# Altium schematic symbol library Diode%.SchLib: 376 symbols (part 5 of 9)
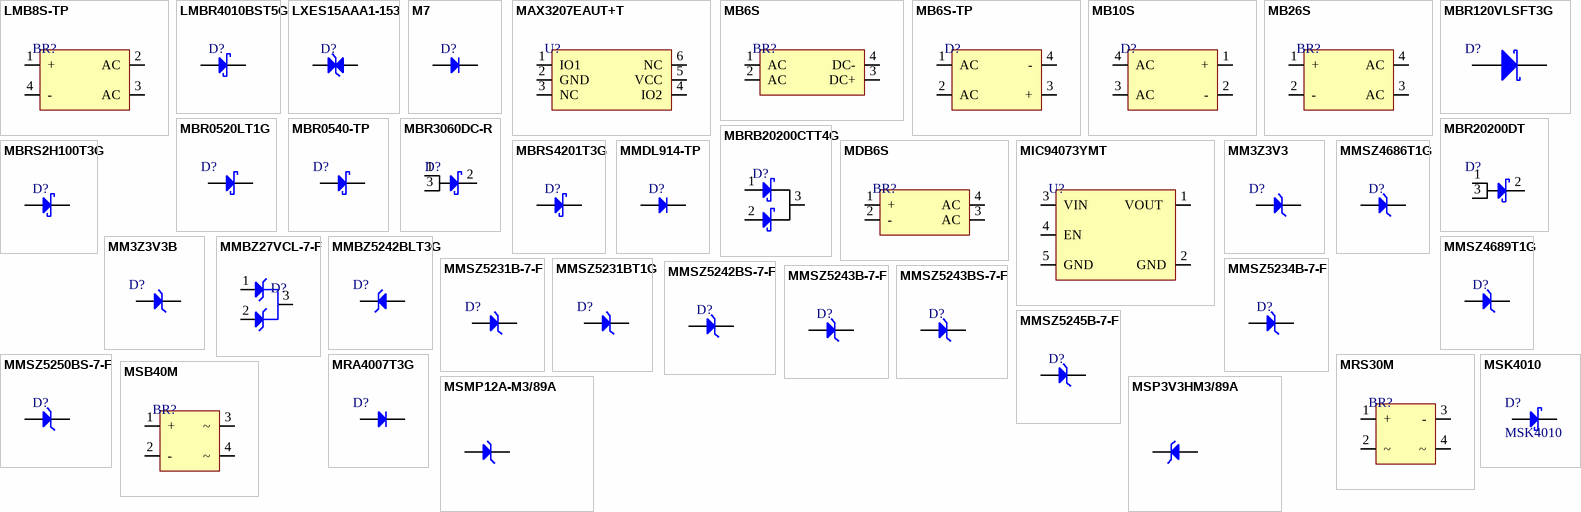
[diagram p13: symbols LMB8S-TP to MSP3V3HM3/89A]

## MIC94073YMT
designator U?
HIGH SIDE POWER SWITCHES; Manufacturer: Mirel Inc.; Manufacturer Part Number: MIC94073YMT; Package: 4-UFDFN Exposed Pad, 4-TMLF®; Item Type: Power Switch
footprint 4-TMLF® (1.2x1.6)
pins: 1 VOUT , 2 GND, 3 VIN, 4 EN, 5 GND

## MM3Z3V3
designator D?
±5% Single 3.1V~3.5V 300mW 3.3V SOD-323 Zener Diodes ROHS; Manufacturer: JSMSEMI; Manufacturer Part Number: MM3Z3V3; Item Type: Diode; ComponentLink1Description: LCSC; ComponentLink1URL: https://www.lcsc.com/product-detail/Zener-Diodes_Shandong-Jingdao-Microelectronics-MM3Z3V3_C123917.html; Package: SOD-323; LCSC Part Number: C123917
footprint SOD-323
pins: 1 K, 2 A

## MM3Z3V3B
designator D?
DIODE ZENER 3.3V 200MW SOD323F; Manufacturer: ON Semiconductor / Fairchild; Manufacturer Part Number: MM3Z3V3B; Forward Voltage: 1V; Tolerance: 2%; Impedance: 89R; Max Reverse Leakage Current: 4.5uA; Test Current: 5mA; Element Configuration: Single; Supplier 1: Digi-Key; Stock 1: 473644; Pricing 1: 1=0.22, 10=0.18, 100=0.0956, 500=0.06288, 1000=0.04276 (USD); Mount: Surface Mount; Number of Pins: 2; Weight: 0.0276g; Min Operating Temperature: -65°C; Max Operating Temperature: 150°C; Packaging: Tape and Reel; Package Quantity: 1; Max Power Dissipation: 200mW; Zener Voltage: 3.3V; Voltage Tolerance: 2%; Power Dissipation: 200mW; Working Voltage: 3.3V; Peak Reverse Current: 4.5uA; Length: 1.3mm; Height: 1mm; Width: 1.7mm; Radiation Hardening: No; REACH SVHC: No SVHC; Lead Free: Lead Free; ComponentLink1URL: http://www.onsemi.com/pub/Collateral/MM3Z9V1B-D.pdf?src-supplier=Digi-Key; ComponentLink1Description: http://www.onsemi.com/pub/Collateral/MM3Z9V1B-D.pdf?src-supplier=Digi-Key; ComponentLink2URL: http://www.mouser.com/ds/2/149/MM3Z3V3B-187166.pdf?src-supplier=Mouser; ComponentLink2Description: http://www.mouser.com/ds/2/149/MM3Z3V3B-187166.pdf?src-supplier=Mouser; ComponentLink3URL: https://www.fairchildsemi.com/datasheets/MM/MM3Z9V1B.pdf?src-supplier=Avnet; ComponentLink3Description: https://www.fairchildsemi.com/datasheets/MM/MM3Z9V1B.pdf?src-supplier=Avnet; ComponentLink4URL: http://www.farnell.com/datasheets/1706525.pdf?src-supplier=Element14; ComponentLink4Description: http://www.farnell.com/datasheets/1706525.pdf?src-supplier=Element14; Supplier Part Number 1: MM3Z3V3BCT-ND; LCSC Part Number: C2978865; Item Type: Diode
footprint SOD323F
pins: 1 A, 2 K

## MMBZ27VCL-7-F
designator D?
TVS DIODE 22VWM 38VC SOT23-3; Manufacturer: Diodes; Manufacturer Part Number: MMBZ27VCL-7-F; Item Type: TVS Diodes; Supplier: Arrow Electronics; LCSC Part Number: C698227; RoHS: Yes; Stock: 153000; Pricing: 3000=0.0452, 6000=0.0449, 9000=0.0303 (USD); ComponentLink1URL: https://datasheet.ciiva.com/4516/ds30352-85130-4516788.pdf?src-supplier=Mouser; ComponentLink1Description: https://datasheet.ciiva.com/4516/ds30352-85130-4516788.pdf?src-supplier=Mouser; ComponentLink2URL: https://datasheet.ciiva.com/27052/1540877-27052409.pdf?src-supplier=Jameco; ComponentLink2Description: https://datasheet.ciiva.com/27052/1540877-27052409.pdf?src-supplier=Jameco; ComponentLink3URL: https://datasheet.ciiva.com/3304/ds30352-3304032.pdf?src-supplier=Avnet; ComponentLink3Description: https://datasheet.ciiva.com/3304/ds30352-3304032.pdf?src-supplier=Avnet; ComponentLink4URL: https://datasheet.ciiva.com/15143/getdatasheetpartid-61120-15143181.pdf?src-supplier=Verical; ComponentLink4Description: https://datasheet.ciiva.com/15143/getdatasheetpartid-61120-15143181.pdf?src-supplier=Verical; ComponentLink5URL: https://datasheet.ciiva.com/16287/ds30352-16287067.pdf?src-supplier=Future+Electronics; ComponentLink5Description: https://datasheet.ciiva.com/16287/ds30352-16287067.pdf?src-supplier=Future+Electronics; ComponentLink6URL: https://datasheet.ciiva.com/11193/ds30352-11193255.pdf?src-supplier=Avnet; ComponentLink6Description: https://datasheet.ciiva.com/11193/ds30352-11193255.pdf?src-supplier=Avnet; ComponentLink7URL: https://datasheet.ciiva.com/5807/ds30352-5807782.pdf?src-supplier=Farnell; ComponentLink7Description: https://datasheet.ciiva.com/5807/ds30352-5807782.pdf?src-supplier=Farnell
footprint SOT-23 (TRANS NPN 40V 0.6A SOT23)
pins: 1 ANODE, 2 Anode, 3 Cathode

## MMBZ5242BLT3G
designator D?
DIODE ZENER 12V 225MW SOT23-3; Manufacturer: ON Semiconductor; Manufacturer Part Number: MMBZ5242BLT3G; Impedance: 30R; Voltage Tolerance: 5%; Power Dissipation: 300mW; Max Reverse Leakage Current: 1uA; Element Configuration: Single; Supplier 1: Digi-Key; Stock 1: 9410; Pricing 1: 1=0.16, 10=0.143, 100=0.0779, 500=0.04792, 1000=0.03267, 2000=0.02777, 5000=0.02505 (USD); Case/Package: SOT-23-3; Number of Pins: 3; Min Operating Temperature: -65°C; Max Operating Temperature: 150°C; Package Quantity: 10000; Packaging: Tape and Reel; Zener Voltage: 12V; Max Power Dissipation: 225mW; Tolerance: 5%; Lead Free: Lead Free; RoHS Compliant: Yes; ComponentLink1URL: http://www.mouser.com/ds/2/308/MMBZ5221BLT1-D-79158.pdf?src-supplier=Mouser; ComponentLink1Description: http://www.mouser.com/ds/2/308/MMBZ5221BLT1-D-79158.pdf?src-supplier=Mouser; Supplier Part Number 1: MMBZ5242BLT3GOSCT-ND; LCSC Part Number: C896784
footprint sot-23
pins: 1 A, 3 K

## MMDL914-TP
designator D?
100V 1V@10mA 4ns 200mA SOD-323 Switching Diodes ROHS; Manufacturer: MCC; Manufacturer Part Number: MMDL914-TP; Item Type: Diode; Supplier: Digikey; LCSC Part Number: C668970; RoHS: Yes; Stock: 172971; Pricing: 1=0.15, 10=0.108, 100=0.0585, 500=0.04594, 1000=0.03191 (USD); ComponentLink1URL: https://datasheet.ciiva.com/6367/mmdl914sod-323-6367364.pdf?src-supplier=Digikey; ComponentLink1Description: https://datasheet.ciiva.com/6367/mmdl914sod-323-6367364.pdf?src-supplier=Digikey; ComponentLink2URL: https://datasheet.ciiva.com/24097/mmdl914sod-323-24097719.pdf?src-supplier=Mouser; ComponentLink2Description: https://datasheet.ciiva.com/24097/mmdl914sod-323-24097719.pdf?src-supplier=Mouser; ComponentLink3URL: https://datasheet.ciiva.com/6367/mmdl914sod-323-6367366.pdf?src-supplier=Digikey; ComponentLink3Description: https://datasheet.ciiva.com/6367/mmdl914sod-323-6367366.pdf?src-supplier=Digikey; ComponentLink4URL: https://datasheet.ciiva.com/6367/mmdl914sod-323-6367368.pdf?src-supplier=Digikey; ComponentLink4Description: https://datasheet.ciiva.com/6367/mmdl914sod-323-6367368.pdf?src-supplier=Digikey
footprint SOD-323
pins: 1 K, 2 A

## MMSZ4686T1G
designator D?
DIODE ZENER 3.9V 500MW SOD123; Manufacturer: ON Semiconductor; Manufacturer Part Number: MMSZ4686T1G; Item Type: Diodes; Material: 4239ConductorMaterial; Polarity: 5054Direction; Supplier: Future Electronics; LCSC Part Number: C236098; RoHS: Yes; Stock: 210000; Pricing: 3000=0.0182, 9000=0.0176, 30000=0.0169, 60000=0.0165, 120000=0.0158 (USD); Voltage Rating (DC): 3.9V; Power Rating: 500mW; Lead Free: 5697LeadFree; ComponentLink1URL: https://datasheet.ciiva.com/894/mmsz4678t1-d-894880.pdf?src-supplier=Digikey; ComponentLink1Description: https://datasheet.ciiva.com/894/mmsz4678t1-d-894880.pdf?src-supplier=Digikey; ComponentLink2URL: https://datasheet.ciiva.com/27056/2011651-27056164.pdf?src-supplier=Jameco; ComponentLink2Description: https://datasheet.ciiva.com/27056/2011651-27056164.pdf?src-supplier=Jameco; ComponentLink3URL: https://datasheet.ciiva.com/46396/1571947-46396198.pdf?src-supplier=Element14; ComponentLink3Description: https://datasheet.ciiva.com/46396/1571947-46396198.pdf?src-supplier=Element14; ComponentLink4URL: https://datasheet.ciiva.com/8346/mmsz4678t1-d-8346072.pdf?src-supplier=Avnet; ComponentLink4Description: https://datasheet.ciiva.com/8346/mmsz4678t1-d-8346072.pdf?src-supplier=Avnet; ComponentLink5URL: https://datasheet.ciiva.com/8347/mmsz4678t1-d-8347974.pdf?src-supplier=Avnet; ComponentLink5Description: https://datasheet.ciiva.com/8347/mmsz4678t1-d-8347974.pdf?src-supplier=Avnet; ComponentLink6URL: https://datasheet.ciiva.com/894/mmsz4678t1-d-894878.pdf?src-supplier=Digikey; ComponentLink6Description: https://datasheet.ciiva.com/894/mmsz4678t1-d-894878.pdf?src-supplier=Digikey; ComponentLink7URL: https://datasheet.ciiva.com/894/mmsz4678t1-d-894879.pdf?src-supplier=Digikey; ComponentLink7Description: https://datasheet.ciiva.com/894/mmsz4678t1-d-894879.pdf?src-supplier=Digikey
footprint SOD-123
pins: 1 A, 2 K

## MMSZ4689T1G
designator D?
DIODE ZENER 5.1V 500MW SOD123; Manufacturer: ON Semiconductor; Manufacturer Part Number: MMSZ4689T1G; Material: Plastic; Breakdown Voltage: 5.36V; Forward Voltage: 900mV; Tolerance: 5%; Max Reverse Leakage Current: 10uA; Zener Current: 50uA; Supplier: Future Electronics; LCSC Part Number: C236187; RoHS: Yes; Item Type: Diode; Stock: 105000; Pricing: 3000=0.0178, 9000=0.0172, 30000=0.0165, 60000=0.0161, 120000=0.0154 (USD); Case/Package: SOD-123-2; Pins: 2; Min Operating Temperature: -55°C; Max Operating Temperature: 150°C; Packaging: Tape and Reel; Voltage Rating (DC): 5.1V; Power Rating: 500mW; Max Power Dissipation: 500mW; Zener Voltage: 5.1V; Package Quantity: 1; Voltage Tolerance: 5%; Power Dissipation: 500mW; Working Voltage: 5.1V; Max Reverse Current: 50uA; Test Current: 50uA; Max Breakdown Voltage: 5.36V; Termination: SMD/SMT; Length: 2.69mm; Width: 1.6mm; Height: 1.12mm; Radiation Hardening: No; Reach SVHC Compliant: No; Lead Free: Lead Free; RoHS Compliant: Yes; ComponentLink1URL: https://datasheet.ciiva.com/15141/getdatasheetpartid-37234-15141921.pdf?src-supplier=Verical; ComponentLink1Description: https://datasheet.ciiva.com/15141/getdatasheetpartid-37234-15141921.pdf?src-supplier=Verical; ComponentLink2URL: https://datasheet.ciiva.com/8347/mmsz4678t1-d-8347996.pdf?src-supplier=Avnet; ComponentLink2Description: https://datasheet.ciiva.com/8347/mmsz4678t1-d-8347996.pdf?src-supplier=Avnet; ComponentLink3URL: https://datasheet.ciiva.com/894/mmsz4678t1-d-894948.pdf?src-supplier=Digikey; ComponentLink3Description: https://datasheet.ciiva.com/894/mmsz4678t1-d-894948.pdf?src-supplier=Digikey; ComponentLink4URL: https://datasheet.ciiva.com/894/mmsz4678t1-d-894949.pdf?src-supplier=Digikey; ComponentLink4Description: https://datasheet.ciiva.com/894/mmsz4678t1-d-894949.pdf?src-supplier=Digikey; ComponentLink5URL: https://datasheet.ciiva.com/894/mmsz4678t1-d-894947.pdf?src-supplier=Digikey; ComponentLink5Description: https://datasheet.ciiva.com/894/mmsz4678t1-d-894947.pdf?src-supplier=Digikey; ComponentLink6URL: https://datasheet.ciiva.com/8026/mmsz4678t1-d-8026838.pdf?src-supplier=Element14; ComponentLink6Description: https://datasheet.ciiva.com/8026/mmsz4678t1-d-8026838.pdf?src-supplier=Element14; ComponentLink7URL: https://datasheet.ciiva.com/22697/1796559-22697915.pdf?src-supplier=Element14; ComponentLink7Description: https://datasheet.ciiva.com/22697/1796559-22697915.pdf?src-supplier=Element14; ComponentLink8URL: https://datasheet.ciiva.com/27054/1925110-27054860.pdf?src-supplier=Jameco; ComponentLink8Description: https://datasheet.ciiva.com/27054/1925110-27054860.pdf?src-supplier=Jameco
footprint SOD-123
pins: 1 A, 2 K

## MMSZ5231B-7-F
designator D?
DIODE ZENER 5.1V 500MW SOD123; Manufacturer: Diodes; Manufacturer Part Number: MMSZ5231B-7-F; Item Type: Zener Diode; Supplier: Future Electronics; Supplier Part Number: 5522370; RoHS: Yes; Category: Zener Diodes; Stock: 273000; Pricing: 3000=0.0138, 12000=0.0132, 45000=0.0127, 90000=0.0124, 225000=0.0118 (USD); ComponentLink1URL: https://datasheet.ciiva.com/34302/1541116-34302407.pdf?src-supplier=Jameco; ComponentLink1Description: https://datasheet.ciiva.com/34302/1541116-34302407.pdf?src-supplier=Jameco; ComponentLink2URL: https://datasheet.ciiva.com/26912/getdatasheetpartid-141394-26912348.pdf?src-supplier=Verical; ComponentLink2Description: https://datasheet.ciiva.com/26912/getdatasheetpartid-141394-26912348.pdf?src-supplier=Verical; ComponentLink3URL: https://datasheet.ciiva.com/4734/ds18010-38133-4734216.pdf?src-supplier=Mouser; ComponentLink3Description: https://datasheet.ciiva.com/4734/ds18010-38133-4734216.pdf?src-supplier=Mouser; LCSC Part Number: C85181
footprint SOD-123
pins: 1 A, 2 K

## MMSZ5231BT1G
designator D?
DIODE ZENER 5.1V 500MW SOD123; Manufacturer: ON Semiconductor; Manufacturer Part Number: MMSZ5231BT1G; Material: Plastic; Max Reverse Leakage Current: 5uA; Impedance: 17R; Tolerance: 5%; Zener Current: 10mA; Test Current: 20mA; Forward Voltage: 900mV; Breakdown Voltage: 5.36V; Supplier 1: Allied Electronics; RoHS: Yes; Category: Zener Diodes; Case/Package: SOD-123-2; Pins: 2; Min Operating Temperature: -55°C; Max Operating Temperature: 150°C; Max Power Dissipation: 500mW; Packaging: Tape and Reel; Zener Voltage: 5.1V; Package Quantity: 3000; Series: Automotive, AEC-Q101; Voltage Tolerance: 5%; Power Dissipation: 500mW; Working Voltage: 5.1V; Max Reverse Current: 5uA; Voltage Rating (DC): 5.1V; Power Rating: 500mW; Length: 2.69mm; Width: 1.6mm; Height: 1.12mm; RoHS Compliant: Yes; Lead Free: Lead Free; Reach SVHC Compliant: No; ComponentLink1URL: https://datasheet.ciiva.com/23815/1708301-23815376.pdf?src-supplier=Newark; ComponentLink1Description: https://datasheet.ciiva.com/23815/1708301-23815376.pdf?src-supplier=Newark; ComponentLink2URL: https://datasheet.ciiva.com/22626/1708301-22626967.pdf?src-supplier=Element14; ComponentLink2Description: https://datasheet.ciiva.com/22626/1708301-22626967.pdf?src-supplier=Element14; ComponentLink3URL: https://datasheet.ciiva.com/4731/mmsz5221bt1-d-4731452.pdf?src-supplier=Mouser; ComponentLink3Description: https://datasheet.ciiva.com/4731/mmsz5221bt1-d-4731452.pdf?src-supplier=Mouser; ComponentLink4URL: https://datasheet.ciiva.com/16200/mmsz5221bt1-d-16200104.pdf?src-supplier=Future+Electronics; ComponentLink4Description: https://datasheet.ciiva.com/16200/mmsz5221bt1-d-16200104.pdf?src-supplier=Future+Electronics; ComponentLink5URL: https://datasheet.ciiva.com/894/mmsz5221bt1-d-894882.pdf?src-supplier=Digi-Key; ComponentLink5Description: https://datasheet.ciiva.com/894/mmsz5221bt1-d-894882.pdf?src-supplier=Digi-Key; ComponentLink6URL: https://datasheet.ciiva.com/894/mmsz5221bt1-d-894883.pdf?src-supplier=Digi-Key; ComponentLink6Description: https://datasheet.ciiva.com/894/mmsz5221bt1-d-894883.pdf?src-supplier=Digi-Key; ComponentLink7URL: https://datasheet.ciiva.com/894/mmsz5221bt1-d-894881.pdf?src-supplier=Digi-Key; ComponentLink7Description: https://datasheet.ciiva.com/894/mmsz5221bt1-d-894881.pdf?src-supplier=Digi-Key; Supplier Part Number 1: 70099546; LCSC Part Number: C66198; Item Type: Diode
footprint SOD-123
pins: 1 A, 2 K

## MMSZ5234B-7-F
designator D?
DIODE ZENER 6.2V 500MW SOD123; Manufacturer: Diodes; Manufacturer Part Number: MMSZ5234B-7-F; Supplier: Future Electronics; Supplier Part Number: 4181776; RoHS: Yes; Category: Zener Diodes; Stock: 81000; Pricing: 3000=0.0211, 9000=0.0203, 30000=0.0195, 60000=0.0191, 120000=0.0183 (USD); Power Rating: 500mW; Voltage Rating (DC): 6.2V; Lead Free: 5697LeadFree; ComponentLink1URL: https://datasheet.ciiva.com/15142/getdatasheetpartid-61110-15142283.pdf?src-supplier=Verical; ComponentLink1Description: https://datasheet.ciiva.com/15142/getdatasheetpartid-61110-15142283.pdf?src-supplier=Verical; ComponentLink2URL: https://datasheet.ciiva.com/27052/1541132-27052413.pdf?src-supplier=Jameco; ComponentLink2Description: https://datasheet.ciiva.com/27052/1541132-27052413.pdf?src-supplier=Jameco; ComponentLink3URL: https://datasheet.ciiva.com/890/ds18010-890520.pdf?src-supplier=Digikey; ComponentLink3Description: https://datasheet.ciiva.com/890/ds18010-890520.pdf?src-supplier=Digikey; ComponentLink4URL: https://datasheet.ciiva.com/890/ds18010-890521.pdf?src-supplier=Digikey; ComponentLink4Description: https://datasheet.ciiva.com/890/ds18010-890521.pdf?src-supplier=Digikey; ComponentLink5URL: https://datasheet.ciiva.com/890/ds18010-890522.pdf?src-supplier=Digikey; ComponentLink5Description: https://datasheet.ciiva.com/890/ds18010-890522.pdf?src-supplier=Digikey
footprint SOD-123
pins: 1 A, 2 K

## MMSZ5242BS-7-F
designator D?
DIODE ZENER 12V 200MW SOD323; Manufacturer: Diodes; Manufacturer Part Number: MMSZ5242BS-7-F; Supplier: Future Electronics; LCSC Part Number: C151457; RoHS: Yes; Item Type: Diodes; Stock: 15000; Pricing: 3000=0.0228, 9000=0.022, 15000=0.0216, 60000=0.0206, 90000=0.02 (USD); ComponentLink1URL: https://datasheet.ciiva.com/4734/ds31038-62930-4734288.pdf?src-supplier=Mouser; ComponentLink1Description: https://datasheet.ciiva.com/4734/ds31038-62930-4734288.pdf?src-supplier=Mouser; ComponentLink2URL: https://datasheet.ciiva.com/892/ds31038-892105.pdf?src-supplier=Digikey; ComponentLink2Description: https://datasheet.ciiva.com/892/ds31038-892105.pdf?src-supplier=Digikey; ComponentLink3URL: https://datasheet.ciiva.com/892/ds31038-892106.pdf?src-supplier=Digikey; ComponentLink3Description: https://datasheet.ciiva.com/892/ds31038-892106.pdf?src-supplier=Digikey; ComponentLink4URL: https://datasheet.ciiva.com/892/ds31038-892107.pdf?src-supplier=Digikey; ComponentLink4Description: https://datasheet.ciiva.com/892/ds31038-892107.pdf?src-supplier=Digikey; ComponentLink5URL: https://datasheet.ciiva.com/8347/ds31038-8347977.pdf?src-supplier=Avnet; ComponentLink5Description: https://datasheet.ciiva.com/8347/ds31038-8347977.pdf?src-supplier=Avnet
footprint SOD-323
pins: 1 K, 2 A

## MMSZ5243B-7-F
designator D?
DIODE ZENER 13V 500MW SOD123; Manufacturer: Diodes Zetex; Manufacturer Part Number: MMSZ5243B-7-F; Supplier: Future Electronics; LCSC Part Number: C513124; RoHS: Yes; Item Type: Diode; Stock: 18000; Pricing: 3000=0.0222, 12000=0.0213, 30000=0.0206, 75000=0.02, 120000=0.0192 (USD)
footprint SOD-123
pins: 1 A, 2 K

## MMSZ5243BS-7-F
designator D?
DIODE ZENER 13V 200MW SOD323; Manufacturer: Diodes Zetex; Manufacturer Part Number: MMSZ5243BS-7-F; Item Type: Diodes; Supplier: Digikey; LCSC Part Number: C5249130; RoHS: Yes; Stock: 7247; Pricing: 1=0.15, 10=0.105, 100=0.0707, 500=0.05384, 1000=0.04814 (USD); ComponentLink1URL: https://datasheet.ciiva.com/8348/ds31038-8348008.pdf?src-supplier=Avnet; ComponentLink1Description: https://datasheet.ciiva.com/8348/ds31038-8348008.pdf?src-supplier=Avnet; ComponentLink2URL: https://datasheet.ciiva.com/891/ds31038-891527.pdf?src-supplier=Digikey; ComponentLink2Description: https://datasheet.ciiva.com/891/ds31038-891527.pdf?src-supplier=Digikey; ComponentLink3URL: https://datasheet.ciiva.com/891/ds31038-891528.pdf?src-supplier=Digikey; ComponentLink3Description: https://datasheet.ciiva.com/891/ds31038-891528.pdf?src-supplier=Digikey; ComponentLink4URL: https://datasheet.ciiva.com/891/ds31038-891529.pdf?src-supplier=Digikey; ComponentLink4Description: https://datasheet.ciiva.com/891/ds31038-891529.pdf?src-supplier=Digikey
footprint SOD-323
pins: 1 K, 2 A

## MMSZ5245B-7-F
designator D?
DIODE ZENER 15V 500MW SOD123; Manufacturer: Diodes; Manufacturer Part Number: MMSZ5245B-7-F; Reverse Voltage: 11V; Supplier: Arrow Electronics; LCSC Part Number: C177050; RoHS: Yes; Item Type: Diodes; Stock: 414000; Pricing: 6000=0.0138 (USD); ComponentLink1URL: https://datasheet.ciiva.com/15142/getdatasheetpartid-110401-15142750.pdf?src-supplier=Verical; ComponentLink1Description: https://datasheet.ciiva.com/15142/getdatasheetpartid-110401-15142750.pdf?src-supplier=Verical; ComponentLink2URL: https://datasheet.ciiva.com/890/ds18010-890775.pdf?src-supplier=Digikey; ComponentLink2Description: https://datasheet.ciiva.com/890/ds18010-890775.pdf?src-supplier=Digikey; ComponentLink3URL: https://datasheet.ciiva.com/890/ds18010-890776.pdf?src-supplier=Digikey; ComponentLink3Description: https://datasheet.ciiva.com/890/ds18010-890776.pdf?src-supplier=Digikey; ComponentLink4URL: https://datasheet.ciiva.com/890/ds18010-890777.pdf?src-supplier=Digikey; ComponentLink4Description: https://datasheet.ciiva.com/890/ds18010-890777.pdf?src-supplier=Digikey; ComponentLink5URL: https://datasheet.ciiva.com/8025/ds18010-8025783.pdf?src-supplier=Element14; ComponentLink5Description: https://datasheet.ciiva.com/8025/ds18010-8025783.pdf?src-supplier=Element14
footprint SOD-123W (DIODE SCHOTTKY 30V 1A SOD123W)
pins: 1 A, 2 K

## MMSZ5250BS-7-F
designator D?
19V~21V 200mW 20V SOD-323-2 Zener Diodes ROHS; Manufacturer Part Number: MMSZ5250BS-7-F; Item Type: Diode; Supplier: Future Electronics; LCSC Part Number: C508233; Manufacturer: Diodes; RoHS: Yes; Stock: 3000; Pricing: 3000=0.0292, 9000=0.0281, 15000=0.0276, 60000=0.0263, 90000=0.0255 (USD); ComponentLink1URL: https://datasheet.ciiva.com/896/ds31038-896169.pdf?src-supplier=Digikey; ComponentLink1Description: https://datasheet.ciiva.com/896/ds31038-896169.pdf?src-supplier=Digikey; ComponentLink2URL: https://datasheet.ciiva.com/896/ds31038-896170.pdf?src-supplier=Digikey; ComponentLink2Description: https://datasheet.ciiva.com/896/ds31038-896170.pdf?src-supplier=Digikey; ComponentLink3URL: https://datasheet.ciiva.com/896/ds31038-896171.pdf?src-supplier=Digikey; ComponentLink3Description: https://datasheet.ciiva.com/896/ds31038-896171.pdf?src-supplier=Digikey; ComponentLink4URL: https://datasheet.ciiva.com/10640/ds31038-10640197.pdf?src-supplier=Avnet; ComponentLink4Description: https://datasheet.ciiva.com/10640/ds31038-10640197.pdf?src-supplier=Avnet
footprint SOD-323
pins: 1 K, 2 A

## MRA4007T3G
designator D?
DIODE GEN PURP 1KV 1A SMA; Manufacturer: ON Semiconductor; Manufacturer Part Number: MRA4007T3G; Max Surge Current: 30A; Forward Voltage: 1.18V; Max Reverse Current: 10uA; Polarity: Standard; Supplier: Arrow Electronics; Supplier Part Number: MRA4007T3G; RoHS: Yes; Category: Rectifier Diodes; Stock: 240000; Pricing: 20000=0.0492, 25000=0.0487, 50000=0.0483, 100000=0.0476 (USD); Case/Package: SMA; Pins: 2; Min Operating Temperature: -55°C; Max Operating Temperature: 175°C; Package Quantity: 1; Forward Current: 1A; Packaging: Tape and Reel; Average Rectified Current: 1A; Max Repetitive Reverse Voltage (Vrrm): 1kV; Max Forward Surge Current (Ifsm): 30A; Peak Non-Repetitive Surge Current: 30A; Voltage Rating (DC): 1kV; Current Rating: 1A; Output Current: 1A; Max Reverse Voltage (DC): 1kV; Reverse Voltage: 1kV; Series: -; Length: 4.32mm; Width: 2.6mm; Height: 2mm; Radiation Hardening: No; Reach SVHC Compliant: No; Lead Free: Lead Free; RoHS Compliant: Yes; ComponentLink1URL: https://datasheet.ciiva.com/34303/2013551-34303843.pdf?src-supplier=Jameco; ComponentLink1Description: https://datasheet.ciiva.com/34303/2013551-34303843.pdf?src-supplier=Jameco; ComponentLink2URL: https://datasheet.ciiva.com/30479/0900766b8078eb75-30479272.pdf?src-supplier=Rs; ComponentLink2Description: https://datasheet.ciiva.com/30479/0900766b8078eb75-30479272.pdf?src-supplier=Rs; ComponentLink3URL: https://datasheet.ciiva.com/7962/mra4003t3-d-7962843.pdf?src-supplier=Element14; ComponentLink3Description: https://datasheet.ciiva.com/7962/mra4003t3-d-7962843.pdf?src-supplier=Element14; ComponentLink4URL: https://datasheet.ciiva.com/7962/mra4003t3-d-7962842.pdf?src-supplier=Element14; ComponentLink4Description: https://datasheet.ciiva.com/7962/mra4003t3-d-7962842.pdf?src-supplier=Element14; ComponentLink5URL: https://datasheet.ciiva.com/22749/1747991-22749573.pdf?src-supplier=Element14; ComponentLink5Description: https://datasheet.ciiva.com/22749/1747991-22749573.pdf?src-supplier=Element14; ComponentLink6URL: https://datasheet.ciiva.com/14558/70099554-14558476.pdf?src-supplier=Allied+Electronics; ComponentLink6Description: https://datasheet.ciiva.com/14558/70099554-14558476.pdf?src-supplier=Allied+Electronics; ComponentLink7URL: https://datasheet.ciiva.com/8299/mra4003t3-d-8299900.pdf?src-supplier=Avnet; ComponentLink7Description: https://datasheet.ciiva.com/8299/mra4003t3-d-8299900.pdf?src-supplier=Avnet; LCSC Part Number: C47921; Item Type: Diode
footprint SMA
pins: 1 K, 2 A

## MRS30M
designator BR?
RAPID GPP RECTIFIER MSB T&R 2.5K; Manufacturer: Diodes; Manufacturer Part Number: MRS30M; Item Type: Bridge Rectifiers; Supplier: Digikey; Supplier Part Number: 31-MRS30MCT-ND; RoHS: No; Stock: 4995; Pricing: 1=0.46, 10=0.357, 100=0.2143, 500=0.19846, 1000=0.13496 (USD)
footprint MSBL
pins: 1 +, 2 ~, 3 -, 4 ~

## MSB40M
designator BR?
1.1V@4A 4A 1000V UMSB Bridge Rectifiers ROHS; Manufacturer: GOODWORK; Manufacturer Part Number: MSB40M; Item Type: Bridge Rectifire; Package: UMSB; LCSC Part Number: C2985033; ComponentLink1Description: LCSC; ComponentLink1URL: https://www.lcsc.com/product-detail/Bridge-Rectifiers_GOODWORK-MSB40M_C2985033.html
footprint UMSB
pins: 1 +, 2 -, 3 ~, 4 ~

## MSK4010
designator D?
SOD-523 Schottky Barrier Diodes (SBD) ROHS; Manufacturer: Tak Cheong; Value: Custom; Manufacturer Part No: MSK4010; Pakage: SOD-523; ComponentLink1Description: LCSC; ComponentLink1URL: https://lcsc.com/product-detail/Schottky-Barrier-Diodes-SBD_Tak-Cheong-MSK4010_C968723.html; LCSC Part No: C968723
footprint MSK4010 (SOD-523 Schottky Barrier Diodes (SBD) ROHS)
pins: 1 A, 2 K

## MSMP12A-M3/89A
designator D?
TVS DIODE 12VWM 19.9VC MICROSMP; Number of Unidirectional Channels: 1; Reverse Standoff Voltage: 12V; Min Breakdown Voltage: 13.3V; Peak Pulse Power: 150W; Power Line Protection: No; Peak Pulse Current: 7.5A; Diode Type: ZENER; LCSC Part Number: C1973858; Item Type: TVS Diode; ComponentLink1Description: LCSC; Supplier: Mouser; Supplier Part Number: 78-MSMP12A-M389A; RoHS: Yes; Category: TVS Diodes; Stock: 17037; Pricing: 1=0.36, 10=0.294, 50=0.294, 100=0.118, 1000=0.069, 10000=0.048 (USD); Mounting Technology: Surface Mount; Min Operating Temperature: -55°C; Max Operating Temperature: 150°C; Packaging: Tape and Reel; Series: TransZorb®; RoHS Compliant: Yes; ComponentLink2URL: http://www.vishay.com/docs/89457/mspm6a.pdf?src-supplier=Digi-Key; ComponentLink2Description: http://www.vishay.com/docs/89457/mspm6a.pdf?src-supplier=Digi-Key; ComponentLink3URL: http://www.vishay.com/docs/89457/msmp6athrumsmp20a.pdf?src-supplier=Digi-Key; ComponentLink3Description: http://www.vishay.com/docs/89457/msmp6athrumsmp20a.pdf?src-supplier=Digi-Key
footprint MicroSMP
pins: 1 A, 2 K

## MSP3V3HM3/89A
designator D?
TVS DIODE 3.3VWM 11.5VC MICROSMP; Manufacturer: Vishay Semiconductors; Manufacturer Part Number: MSP3V3HM3/89A; Direction: Unidirectional; Operating Supply Voltage: 3.3V; Max Surge Current: 75A; Breakdown Voltage: 4.1V; Clamping Voltage: 11V; Peak Pulse Power: 150W; Number of Unidirectional Channels: 1; Power Line Protection: No; Peak Pulse Current: 87A; Test Current: 1mA; Max Reverse Leakage Current: 200uA; Diode Type: ZENER; LCSC Part Number: C241899; Item Type: TVS Diode; ComponentLink2URL: https://datasheet.ciiva.com/14080/msp3v3-14080471.pdf?src-supplier=Digi-Key; ComponentLink2Description: https://datasheet.ciiva.com/14080/msp3v3-14080471.pdf?src-supplier=Digi-Key; Supplier: Mouser; Supplier Part Number: 625-MSP3V3HM3; RoHS: Yes; Category: TVS Diodes; Stock: 14861; Pricing: 1=0.39, 10=0.313, 50=0.313, 100=0.165, 1000=0.068, 10000=0.05 (USD); Mounting Technology: Surface Mount; Min Operating Temperature: -55°C; Max Operating Temperature: 150°C; Packaging: Tape and Reel; Package Quantity: 4500; Polarity: Unidirectional; Reverse Standoff Voltage: 3.3V; Min Breakdown Voltage: 4.1V; Series: Automotive, AEC-Q101, TransZorb®, eSMP™; RoHS Compliant: Yes; ComponentLink1URL: https://datasheet.ciiva.com/14080/msp3v3-14080471.pdf?src-supplier=Digikey; ComponentLink1Description: https://datasheet.ciiva.com/14080/msp3v3-14080471.pdf?src-supplier=Digikey
footprint MicroSMP
pins: 1 A, 2 K

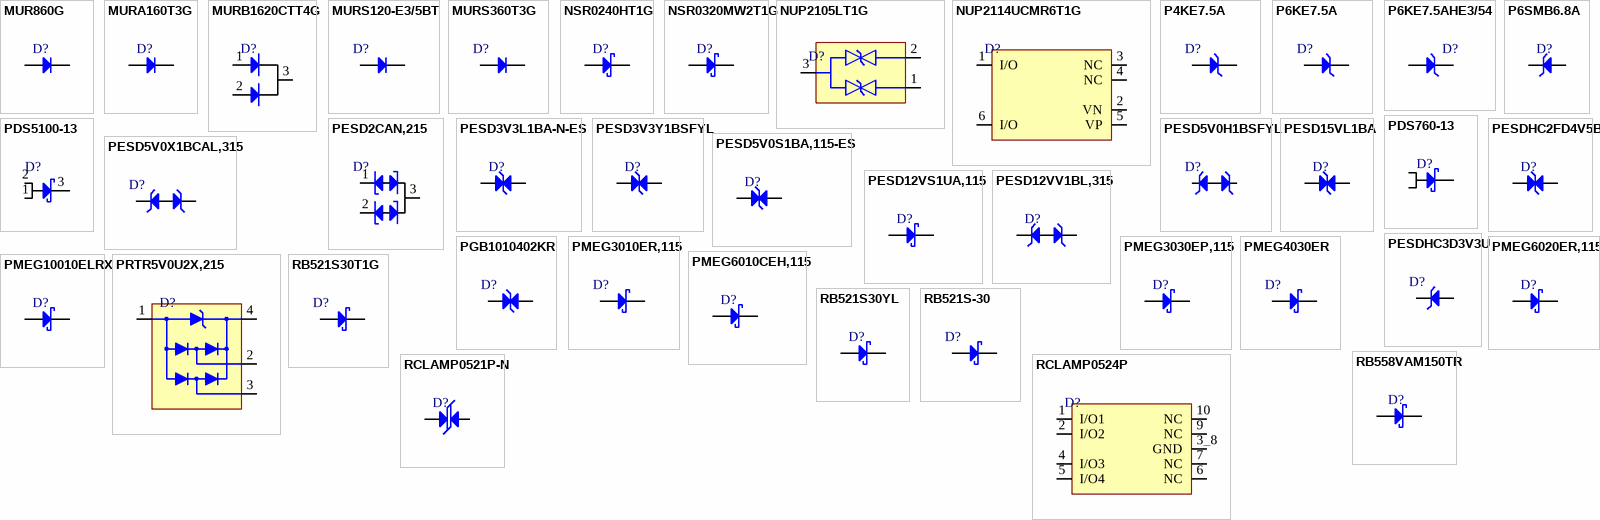
[diagram p5: symbols MUR860G to RCLAMP0524P]

## MUR860G
designator D?
DIODE GEN PURP 600V 8A TO220-2; Manufacturer: ON Semiconductor; Manufacturer Part Number: MUR860G; Supplier: Future Electronics; LCSC Part Number: C50428; RoHS: Yes; Item Type: Diode; Stock: 4012; Pricing: 50=0.565, 200=0.54, 750=0.515, 1500=0.505, 3750=0.475 (USD); ComponentLink1URL: https://datasheet.ciiva.com/14169/zamur840-860-data-e-14169160.pdf?src-supplier=Distrelec; ComponentLink1Description: https://datasheet.ciiva.com/14169/zamur840-860-data-e-14169160.pdf?src-supplier=Distrelec; ComponentLink2URL: https://datasheet.ciiva.com/15144/getdatasheetpartid-103084-15144871.pdf?src-supplier=Verical; ComponentLink2Description: https://datasheet.ciiva.com/15144/getdatasheetpartid-103084-15144871.pdf?src-supplier=Verical; ComponentLink3URL: https://datasheet.ciiva.com/14557/70099562-14557677.pdf?src-supplier=Allied+Electronics; ComponentLink3Description: https://datasheet.ciiva.com/14557/70099562-14557677.pdf?src-supplier=Allied+Electronics; ComponentLink4URL: https://datasheet.ciiva.com/8299/mur820-d-8299771.pdf?src-supplier=Avnet; ComponentLink4Description: https://datasheet.ciiva.com/8299/mur820-d-8299771.pdf?src-supplier=Avnet; ComponentLink5URL: https://datasheet.ciiva.com/916/mur820-d-916462.pdf?src-supplier=Digikey; ComponentLink5Description: https://datasheet.ciiva.com/916/mur820-d-916462.pdf?src-supplier=Digikey; ComponentLink6URL: https://datasheet.ciiva.com/16210/mur820-d-16210191.pdf?src-supplier=Future+Electronics; ComponentLink6Description: https://datasheet.ciiva.com/16210/mur820-d-16210191.pdf?src-supplier=Future+Electronics
footprint TO-220-2
pins: 1 K, 2 A

## MURA160T3G
designator D?
DIODE GEN PURP 600V 1A SMA; Manufacturer: ON Semiconductor; Manufacturer Part Number: MURA160T3G; Forward Current: 2A; Max Reverse Current: 5uA; Max Surge Current: 30A; Forward Voltage: 1.25V; Recovery Time: 75ns; Polarity: Standard; Supplier: Future Electronics; LCSC Part Number: C50432; RoHS: Yes; Item Type: Diode; Stock: 190000; Pricing: 5000=0.109, 10000=0.106, 15000=0.104, 20000=0.103, 25000=0.0996 (USD); Case/Package: SMA; Pins: 2; Min Operating Temperature: -65°C; Max Operating Temperature: 175°C; Package Quantity: 1; Packaging: Tape and Reel; Average Rectified Current: 2A; Reverse Recovery Time: 75ns; Max Repetitive Reverse Voltage (Vrrm): 600V; Peak Non-Repetitive Surge Current: 30A; Max Forward Surge Current (Ifsm): 30A; Voltage Rating (DC): 600V; Current Rating: 2A; Output Current: 1A; Max Reverse Voltage (DC): 600V; Reverse Voltage: 600V; Series: -; Reverse Recovery Time-Max: 75ns; Length: 4.32mm; Width: 2.6mm; Height: 2mm; Radiation Hardening: No; Reach SVHC Compliant: No; Lead Free: Lead Free; Halogen Free: Halogen Free; RoHS Compliant: Yes; ComponentLink1URL: https://datasheet.ciiva.com/8293/mura160t3-d-8293035.pdf?src-supplier=Avnet; ComponentLink1Description: https://datasheet.ciiva.com/8293/mura160t3-d-8293035.pdf?src-supplier=Avnet; ComponentLink2URL: https://datasheet.ciiva.com/27056/2015775-27056224.pdf?src-supplier=Jameco; ComponentLink2Description: https://datasheet.ciiva.com/27056/2015775-27056224.pdf?src-supplier=Jameco; ComponentLink3URL: https://datasheet.ciiva.com/16395/mura160t3-d-16395990.pdf?src-supplier=Future+Electronics; ComponentLink3Description: https://datasheet.ciiva.com/16395/mura160t3-d-16395990.pdf?src-supplier=Future+Electronics
footprint SMA
pins: 1 K, 2 A

## MURB1620CTT4G
designator D?
DIODE ARRAY GP 200V 8A D2PAK; Manufacturer: ON Semiconductor; Manufacturer Part Number: MURB1620CTT4G; Supplier: Future Electronics; LCSC Part Number: C236158; RoHS: Yes; Item Type: Diode; Stock: 72800; Pricing: 800=0.64, 1600=0.625, 2400=0.615, 3200=0.61, 4000=0.59 (USD); ComponentLink1URL: https://datasheet.ciiva.com/906/murb1620ct-d-906005.pdf?src-supplier=Digikey; ComponentLink1Description: https://datasheet.ciiva.com/906/murb1620ct-d-906005.pdf?src-supplier=Digikey; ComponentLink2URL: https://datasheet.ciiva.com/16293/murb1620ct-d-16293538.pdf?src-supplier=Future+Electronics; ComponentLink2Description: https://datasheet.ciiva.com/16293/murb1620ct-d-16293538.pdf?src-supplier=Future+Electronics; ComponentLink3URL: https://datasheet.ciiva.com/8292/murb1620ct-d-8292357.pdf?src-supplier=Avnet; ComponentLink3Description: https://datasheet.ciiva.com/8292/murb1620ct-d-8292357.pdf?src-supplier=Avnet; ComponentLink4URL: https://datasheet.ciiva.com/906/murb1620ct-d-906006.pdf?src-supplier=Digikey; ComponentLink4Description: https://datasheet.ciiva.com/906/murb1620ct-d-906006.pdf?src-supplier=Digikey; ComponentLink5URL: https://datasheet.ciiva.com/906/murb1620ct-d-906007.pdf?src-supplier=Digikey; ComponentLink5Description: https://datasheet.ciiva.com/906/murb1620ct-d-906007.pdf?src-supplier=Digikey
footprint D2Pak.
pins: 1 A, 2 A, 3 K

## MURS120-E3/5BT
designator D?
Rectifier Diode Switching 200V 2A 35ns 2-Pin SMB T/R; Manufacturer: Vishay Semiconductors; Manufacturer Part Number: MURS120-E3/5BT; Max Reverse Current: 2uA; Max Surge Current: 40A; Current: 1A; Supplier: Digikey; Supplier Part Number: MURS120-E3/5BTGICT-ND; RoHS: Yes; Category: Rectifier Diodes; Stock: 22917; Pricing: 1=0.44, 10=0.378, 100=0.2629, 500=0.20524, 1000=0.16682 (USD); Mounting Technology: Surface Mount; Case/Package: SMB; Pins: 2; Min Operating Temperature: -65°C; Max Operating Temperature: 175°C; Packaging: Tape and Reel; Forward Current: 2A; Package Quantity: 3200; Recovery Time: 35ns; Average Rectified Current: 2A; Reverse Recovery Time: 35ns; Max Repetitive Reverse Voltage (Vrrm): 200V; Peak Non-Repetitive Surge Current: 40A; Voltage: 200V; Reverse Voltage: 200V; Max Reverse Voltage (DC): 200V; Series: -; Radiation Hardening: No; RoHS Compliant: Yes; ComponentLink1URL: http://www.mouser.com/ds/2/427/88687-240345.pdf?src-supplier=Mouser; ComponentLink1Description: http://www.mouser.com/ds/2/427/88687-240345.pdf?src-supplier=Mouser; ComponentLink2URL: http://components.arrow.com/part/dataview/42678636S6900221N5680?src-supplier=Arrow+Electronics; ComponentLink2Description: http://components.arrow.com/part/dataview/42678636S6900221N5680?src-supplier=Arrow+Electronics; ComponentLink3URL: http://www.vishay.com/docs/88687/murs120.pdf?src-supplier=Digikey; ComponentLink3Description: http://www.vishay.com/docs/88687/murs120.pdf?src-supplier=Digikey; ComponentLink4URL: http://www.vishay.com/docs/88687/88687.pdf?src-supplier=Avnet; ComponentLink4Description: http://www.vishay.com/docs/88687/88687.pdf?src-supplier=Avnet; Package: DO-214AA (SMB); Item Type: Diode
footprint DO-214AA (SMB)
pins: 1 K, 2 A

## MURS360T3G
designator D?
SMC(DO-214AB) Diodes - Fast Recovery Rectifiers ROHS; Manufacturer: FUXINSEMI; Manufacturer Part Number: MURS360T3G; Package: SMC(DO-214AB); LCSC Part Number: C7436549; Item Type: Diodes; ComponentLink1Description: LCSC; ComponentLink1URL: https://www.lcsc.com/product-detail/Diodes-Fast-Recovery-Rectifiers_FUXINSEMI-MURS360T3G_C7436549.html
footprint SMC
pins: 1 K, 2 A

## NSR0240HT1G
designator D?
DIODE SCHOTTKY 40V 250MA SOD323; Manufacturer: ON Semiconductor; Manufacturer Part Number: NSR0240HT1G; Value: 4pF; Supplier: Avnet; LCSC Part Number: C152519; RoHS: Yes; Item Type: Diode; Stock: 6655; Pricing: 1=0.272, 25=0.186, 50=0.139, 100=0.091, 250=0.084 (USD); Reverse Voltage: 40V; ComponentLink1URL: https://datasheet.ciiva.com/915/nsr0240h-d-915416.pdf?src-supplier=Digikey; ComponentLink1Description: https://datasheet.ciiva.com/915/nsr0240h-d-915416.pdf?src-supplier=Digikey; ComponentLink2URL: https://datasheet.ciiva.com/915/nsr0240h-d-915417.pdf?src-supplier=Digikey; ComponentLink2Description: https://datasheet.ciiva.com/915/nsr0240h-d-915417.pdf?src-supplier=Digikey; ComponentLink3URL: https://datasheet.ciiva.com/915/nsr0240h-d-915418.pdf?src-supplier=Digikey; ComponentLink3Description: https://datasheet.ciiva.com/915/nsr0240h-d-915418.pdf?src-supplier=Digikey; ComponentLink4URL: https://datasheet.ciiva.com/16396/nsr0240h-d-16396521.pdf?src-supplier=Future+Electronics; ComponentLink4Description: https://datasheet.ciiva.com/16396/nsr0240h-d-16396521.pdf?src-supplier=Future+Electronics
footprint SOD-323
pins: 1 K, 2 A

## NSR0320MW2T1G
designator D?
DIODE SCHOTTKY 20V 1A SOD323; Manufacturer: ON Semiconductor; Manufacturer Part Number: NSR0320MW2T1G; Max Reverse Current: 50uA; Forward Voltage: 500mV; Max Repetitive Reverse Voltage (Vrrm): 23V; Max Forward Surge Current (Ifsm): 5A; Power Dissipation: 200mW; Element Configuration: Single; Value: 25pF; Supplier: Future Electronics; LCSC Part Number: C48192; RoHS: Yes; Item Type: Diode; Stock: 165000; Pricing: 3000=0.0283, 9000=0.0276, 15000=0.0273, 30000=0.0253, 60000=0.0265, 90000=0.0259 (USD); Case/Package: SOD-323-2; Pins: 2; Min Operating Temperature: -55°C; Max Operating Temperature: 125°C; Forward Current: 1A; Package Quantity: 1; Packaging: Tape and Reel; Average Rectified Current: 1A; Max Reverse Leakage Current: 50uA; Max Reverse Voltage (DC): 20V; Series: -; Reverse Voltage: 20V; Length: 1.8mm; Width: 1.35mm; Height: 0.9mm; Radiation Hardening: No; Reach SVHC Compliant: No; Lead Free: Lead Free; RoHS Compliant: Yes; ComponentLink1URL: https://datasheet.ciiva.com/915/nsr0320mw2t1-d-915506.pdf?src-supplier=Avnet; ComponentLink1Description: https://datasheet.ciiva.com/915/nsr0320mw2t1-d-915506.pdf?src-supplier=Avnet; ComponentLink2URL: https://datasheet.ciiva.com/4714/nsr0320mw2t1-d-97861-4714197.pdf?src-supplier=Mouser; ComponentLink2Description: https://datasheet.ciiva.com/4714/nsr0320mw2t1-d-97861-4714197.pdf?src-supplier=Mouser; ComponentLink3URL: https://datasheet.ciiva.com/915/nsr0320mw2t1-d-915508.pdf?src-supplier=Digikey; ComponentLink3Description: https://datasheet.ciiva.com/915/nsr0320mw2t1-d-915508.pdf?src-supplier=Digikey; ComponentLink4URL: https://datasheet.ciiva.com/16210/nsr0320mw2t1-d-16210139.pdf?src-supplier=Future+Electronics; ComponentLink4Description: https://datasheet.ciiva.com/16210/nsr0320mw2t1-d-16210139.pdf?src-supplier=Future+Electronics
footprint SOD-323
pins: 1 K, 2 A

## NUP2105LT1G
designator D?
TVS DIODE 24VWM 44VC SOT233; Manufacturer: onsemi; Manufacturer Part Number: NUP2105LT1G; Manufacturer Lifecycle Status: ACTIVE; Item Type: TVS Diodes; Breakdown Voltage: 29.1V; Value: 30pF; Clamping Voltage: 44V; Direction: Bidirectional; Element Configuration: Dual; ESD Protection: Yes; Leakage Current: 100nA; Max Breakdown Voltage: 32V; Max Power Dissipation: 350W; Max Surge Current: 8A; Min Breakdown Voltage: 26.2V; Number of Bidirectional Channels: 2; Operating Supply Voltage: 24V; Power Line Protection: No; Test Current: 1mA; Supplier: Arrow Electronics; LCSC Part Number: C14486; RoHS: Compliant; Stock: 2046000; Pricing: 3000=0.0671 (USD); Case/Package: SOT-23; China RoHS: Compliant; Composition: Zener; Contact Plating: Tin; Depth: 1.3mm; Halogen Free: Halogen Free; Height: 940µm; Lead Free: Lead Free; Length: 2.9mm; Lifecycle Status: Production; Max Operating Temperature: 150°C; Max Reverse Leakage Current: 100nA; Min Operating Temperature: -55°C; Number of Channels: 2; Number of Elements: 2; Number of Lines: 2; Pins: 3; Number of Terminals: 3; Packaging: Tape and Reel; Peak Pulse Current: 8A; Peak Pulse Power: 350W; Peak Reverse Current: 100nA; Polarity: Bidirectional; Radiation Hardening: No; REACH SVHC: Yes; Reverse Standoff Voltage: 24V; Termination: SMD/SMT; Width: 1.3mm; Working Voltage: 24V; ComponentLink1URL: https://datasheet.octopart.com:443/NUP2105LT1G-onsemi-datasheet-180968600.pdf?src-supplier=IHS; ComponentLink1Description: https://datasheet.octopart.com:443/NUP2105LT1G-onsemi-datasheet-180968600.pdf?src-supplier=IHS; ComponentLink2URL: https://datasheet.octopart.com:443/NUP2105LT1G-ON-Semiconductor-datasheet-141916699.pdf?src-supplier=Upverter; ComponentLink2Description: https://datasheet.octopart.com:443/NUP2105LT1G-ON-Semiconductor-datasheet-141916699.pdf?src-supplier=Upverter; ComponentLink3URL: https://datasheet.octopart.com:443/NUP2105LT1G-ON-Semiconductor-datasheet-138898254.pdf?src-supplier=onsemi; ComponentLink3Description: https://datasheet.octopart.com:443/NUP2105LT1G-ON-Semiconductor-datasheet-138898254.pdf?src-supplier=onsemi; ComponentLink4URL: https://datasheet.octopart.com:443/NUP2105LT1G-ON-Semiconductor-datasheet-8329749.pdf?src-supplier=element14+APAC; ComponentLink4Description: https://datasheet.octopart.com:443/NUP2105LT1G-ON-Semiconductor-datasheet-8329749.pdf?src-supplier=element14+APAC; ComponentLink5URL: https://datasheet.octopart.com:443/NUP2105LT1G-onsemi-datasheet-163746571.pdf?src-supplier=element14+APAC; ComponentLink5Description: https://datasheet.octopart.com:443/NUP2105LT1G-onsemi-datasheet-163746571.pdf?src-supplier=element14+APAC; ComponentLink6URL: https://datasheet.octopart.com:443/NUP2105LT1G-ON-Semiconductor-datasheet-62289975.pdf?src-supplier=RS+(Formerly+Allied+Electronics); ComponentLink6Description: https://datasheet.octopart.com:443/NUP2105LT1G-ON-Semiconductor-datasheet-62289975.pdf?src-supplier=RS+(Formerly+Allied+Electronics); ComponentLink7URL: https://datasheet.octopart.com:443/NUP2105LT1G-ON-Semiconductor-datasheet-10979798.pdf?src-supplier=TME; ComponentLink7Description: https://datasheet.octopart.com:443/NUP2105LT1G-ON-Semiconductor-datasheet-10979798.pdf?src-supplier=TME; ComponentLink8URL: https://datasheet.octopart.com:443/NUP2105LT1G-onsemi-datasheet-157205202.pdf?src-supplier=TME; ComponentLink8Description: https://datasheet.octopart.com:443/NUP2105LT1G-onsemi-datasheet-157205202.pdf?src-supplier=TME; ComponentLink9URL: https://datasheet.octopart.com:443/NUP2105LT1G-onsemi-datasheet-38906.pdf?src-supplier=Master+Electronics; ComponentLink9Description: https://datasheet.octopart.com:443/NUP2105LT1G-onsemi-datasheet-38906.pdf?src-supplier=Master+Electronics; ComponentLink10URL: https://datasheet.octopart.com:443/NUP2105LT1G.-ON-Semiconductor-datasheet-94100686.pdf?src-supplier=Newark; ComponentLink10Description: https://datasheet.octopart.com:443/NUP2105LT1G.-ON-Semiconductor-datasheet-94100686.pdf?src-supplier=Newark; ComponentLink11URL: https://datasheet.octopart.com:443/NUP2105LT1G-ON-Semiconductor-datasheet-14047665.pdf?src-supplier=iiiC; ComponentLink11Description: https://datasheet.octopart.com:443/NUP2105LT1G-ON-Semiconductor-datasheet-14047665.pdf?src-supplier=iiiC; ComponentLink12URL: http://sigma.octopart.com:80/15540786/rohs_certificate/ON-Semiconductor-NUP2105LT1G.pdf?src-supplier=Compliance+Statements; ComponentLink12Description: http://sigma.octopart.com:80/15540786/rohs_certificate/ON-Semiconductor-NUP2105LT1G.pdf?src-supplier=Compliance+Statements; ComponentLink13URL: http://sigma.octopart.com:80/15684253/materials_sheet/ON-Semiconductor-NUP2105LT1G.csv?src-supplier=Compliance+Statements; ComponentLink13Description: http://sigma.octopart.com:80/15684253/materials_sheet/ON-Semiconductor-NUP2105LT1G.csv?src-supplier=Compliance+Statements; ComponentLink14URL: http://sigma.octopart.com:80/150629775/rohs_statement/ON-Semiconductor-NUP2105LT1G.pdf?src-supplier=Compliance+Statements; ComponentLink14Description: http://sigma.octopart.com:80/150629775/rohs_statement/ON-Semiconductor-NUP2105LT1G.pdf?src-supplier=Compliance+Statements; ComponentLink15URL: http://sigma.octopart.com:80/reach_statement/ON-Semiconductor-company-79.pdf?src-supplier=Compliance+Statements; ComponentLink15Description: http://sigma.octopart.com:80/reach_statement/ON-Semiconductor-company-79.pdf?src-supplier=Compliance+Statements; ComponentLink16URL: https://octopart.com:443/opatz8j6/c1?t=ZMQXRxl-tlOkTyCYWhiMSP0LPI36EMzxCu-rt4xVRkID6w1lkEqxXgfbyVHAv14EjzJQpMVrLm_GTNZmohIwKCbSQuhxgS4aaCOzuMZuzdtTNQjpOCOkObyoWTwnGitjD_aKANRAh2lPw-KtIiSN1C9a6qccJDCVrU3OyukjJjMVpNxQPGMvXs50OIMOtkcrM5shLr84_QV0TpV-tx49makq4PEa-F8ImDZxhjRMek526FA-FcjWLTSpNIusNfqu_3SnxPi4ucx5Ny24zrervKXbTtAk3aU33KfwhMqxTE9mwBLbd5ol23c2I0SDhKArEjQYMqXQ2s8XiDN6A3kYu5cM-5e4RY3v1HohIOej&src-supplier=Compliance+Statements; ComponentLink16Description: https://octopart.com:443/opatz8j6/c1?t=ZMQXRxl-tlOkTyCYWhiMSP0LPI36EMzxCu-rt4xVRkID6w1lkEqxXgfbyVHAv14EjzJQpMVrLm_GTNZmohIwKCbSQuhxgS4aaCOzuMZuzdtTNQjpOCOkObyoWTwnGitjD_aKANRAh2lPw-KtIiSN1C9a6qccJDCVrU3OyukjJjMVpNxQPGMvXs50OIMOtkcrM5shLr84_QV0TpV-tx49makq4PEa-F8ImDZxhjRMek526FA-FcjWLTSpNIusNfqu_3SnxPi4ucx5Ny24zrervKXbTtAk3aU33KfwhMqxTE9mwBLbd5ol23c2I0SDhKArEjQYMqXQ2s8XiDN6A3kYu5cM-5e4RY3v1HohIOej&src-supplier=Compliance+Statements; ComponentLink17URL: https://octopart.com:443/opatz8j6/c1?t=YAOrV0sMfXqVKWiE8k6dH1WclSlXB8gtlFWIwd4S7cYIeFCwgkBwbQJ5bWgsFHDi1PC-Qpb_Ct26CUG4UP-SQd806vdedNOA1AZ0mSUejaT1W15FwcKfZSqKtOg6OcLIZhGfUMXc4tA2cbQkgpIhx2KL7fZwcWhjVKDmOvUiltx43fdyMtIeSqzWtG30gLqCacBQFQmUjDNp97EetbhDXMa2NNxkO77MiJ1iJWdcIgpl2SLRAqm79JYpxIDHGLW2aimYKGEaixugE9-YzaQRB_J1_LvMpaZzYYa86eJBg1j47JCsO_PKNIbsx3s0tfo-1v4YqdsprCQBLNtzKj_wzUXjJuCrJvlRKr5GCqo&src-supplier=Compliance+Statements; ComponentLink17Description: https://octopart.com:443/opatz8j6/c1?t=YAOrV0sMfXqVKWiE8k6dH1WclSlXB8gtlFWIwd4S7cYIeFCwgkBwbQJ5bWgsFHDi1PC-Qpb_Ct26CUG4UP-SQd806vdedNOA1AZ0mSUejaT1W15FwcKfZSqKtOg6OcLIZhGfUMXc4tA2cbQkgpIhx2KL7fZwcWhjVKDmOvUiltx43fdyMtIeSqzWtG30gLqCacBQFQmUjDNp97EetbhDXMa2NNxkO77MiJ1iJWdcIgpl2SLRAqm79JYpxIDHGLW2aimYKGEaixugE9-YzaQRB_J1_LvMpaZzYYa86eJBg1j47JCsO_PKNIbsx3s0tfo-1v4YqdsprCQBLNtzKj_wzUXjJuCrJvlRKr5GCqo&src-supplier=Compliance+Statements
footprint SOT-23 (TRANS NPN 40V 0.6A SOT23)
pins: 1, 2, 3